# Altium schematic symbol library Battery.SchLib: 14 symbols
Pins are listed as number, name and electrical type; pins without a type are passive.

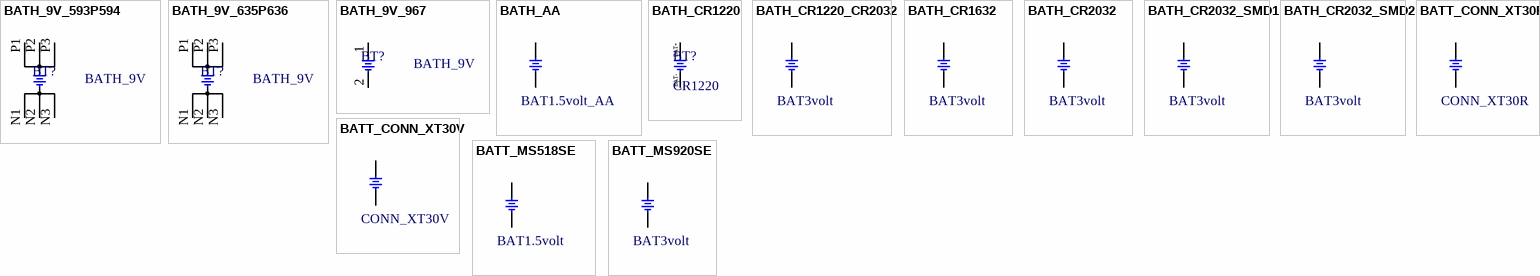
[diagram p0: symbols BATH_9V_593P594 to BATT_MS920SE]

## BATH_9V_593P594
designator BT?, comment BATH_9V
BATTERY HOLDER, 9v; MANF_P#: 593, 594; MANF: Keystone; .: http://www.chila.ir; VALUE: BATH_9V
footprint BTH_9V_593P594 (BATTERY HOLDER, keystone 593, 594)
pins: N1, N2, N3, P1, P2, P3

## BATH_9V_635P636
designator BT?, comment BATH_9V
BATTERY HOLDER, 9v; MANF_P#: 635, 636; MANF: Keystone; .: http://www.chila.ir; VALUE: BATH_9V
footprint BTH_9V_635P636 (BATTERY HOLDER, keystone 635, 636)
pins: N1, N2, N3, P1, P2, P3

## BATH_9V_967
designator BT?, comment BATH_9V
BATTERY HOLDER, 9v; MANF_P#: 967; MANF: Keystone; .: http://www.chila.ir; VALUE: BATH_9V
footprint BTH_9V_967 (BATTERY HOLDER, keystone 967)
pins: 1, 2

## BATH_AA
designator BT?, comment BAT1.5volt_AA
BATTERY HOLDER, AA; MANF_P#: Keystone 82; .: http://www.chila.ir; VALUE: BAT1.5volt_AA
footprint BTH_AA (Keystone 82)
footprint BTH_AA_2
pins: 1, 2

## BATH_CR1220
designator BT?, comment CR1220
BATTERY HOLDER, CR1220 SMD; Code: 11008-012; Designed by: TranLuyen; Code_sub1: 10101-015; Value: CR1220; ComponentLink1Description: Links; ComponentLink1URL: https://dientutuonglai.com/san-pham/?keyword=11008-012&group_product=
footprint BTH1220 (COIN CELL BATTERY HOLDER 1220 12mm)
pins: 1 BAT+, 2
text: BAT-

## BATH_CR1220_CR2032
designator BT?, comment BAT3volt
BATTERY HOLDER, CR1220/CR2032; MANF_P#: -; .: http://www.chila.ir; VALUE: BAT3volt
footprint BTH1220_2032 (COIN CELL BATTERY HOLDER 1220 12mm CR2032)
pins: 1, 2

## BATH_CR1632
designator BT?, comment BAT3volt
BATTERY HOLDER, CR1632 CR1620 CR1616; MANF_P#: BH600; .: http://www.chila.ir; VALUE: BAT3volt
footprint BTH1632_BH600 (Battery Holder BH600 CR1632 CR1620 CR1616)
pins: 1, 2

## BATH_CR2032
designator BT?, comment BAT3volt
BATTERY HOLDER, CR2032; MANF_P#: -; .: http://www.chila.ir; VALUE: BAT3volt
footprint BTH2032 (CR2032 BATTERY HOLDER)
pins: 1, 2

## BATH_CR2032_SMD1
designator BT?, comment BAT3volt
BATTERY HOLDER, CR2032 SMD; MANF_P#: -; .: http://www.chila.ir; VALUE: BAT3volt
footprint BTH2032_SMD1 (COIN CELL BATTERY HOLDER 2032 20mm KEYSTONE3002)
pins: 1, 2

## BATH_CR2032_SMD2
designator BT?, comment BAT3volt
BATTERY HOLDER, CR2032 SMD; MANF_P#: -; .: http://www.chila.ir; VALUE: BAT3volt
footprint BTH2032_SMD2
pins: 1, 2

## BATT_CONN_XT30R
designator BT?, comment CONN_XT30R
BATTERY, CONN_XT30R; MANF: SEIKO; MANF_P#: -; MANF_P#2: -; .: http://www.chila.ir; PARAM: -; PARAM2: -; VALUE: CONN_XT30R
footprint BT_CONN_XT30R (BATTERY CONN XT30)
pins: 1, 2

## BATT_CONN_XT30V
designator BT?, comment CONN_XT30V
BATTERY, CONN_XT30V; MANF: SEIKO; MANF_P#: -; MANF_P#2: -; .: http://www.chila.ir; PARAM: -; PARAM2: -; VALUE: CONN_XT30V
footprint BT_CONN_XT30V (BATTERY CONN XT30)
pins: 1, 2

## BATT_MS518SE
designator BT?, comment BAT1.5volt
BATTERY HOLDER, MS518SE TS518FE; MANF_P#: MS518SE-FL35E; MANF_P#2: TS518FE-FL35E; MANF: SEIKO; .: http://www.chila.ir; VALUE: BAT1.5volt
footprint BT_TS518FE_FL35E (MS518FE TS518FE FL35E SEIKO BATTERY)
pins: 1, 2

## BATT_MS920SE
designator BT?, comment BAT3volt
BATTERY, Lithium Rechargeable, MS920SE; MANF_P#2: MS920SE-FL27E; MANF: SEIKO; PARAM: Lithium Rechargeable, 11mAh; PARAM2: 3V; MANF_P#: MS920SE; .: http://www.chila.ir; VALUE: BAT3volt
footprint BT_MS920SE (Footprint not found)
pins: 1, 2